# Altium schematic symbol library header-2x4.SchLib: 1 symbol
Pins are listed as number, name and electrical type; pins without a type are passive.

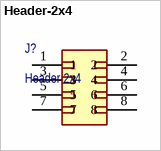
[diagram p0: symbol Header-2x4]

## Header-2x4
designator J?, comment Header 2x4
Dual-row, 8-pin connector; Manufacturer: *; Manufacturer Part Number: *
footprint Header-2x4-THT-P2.54 (2x4 vertical male pin header, 2.54 mm pitch, plated through-hole, 8 positions.)
pins: 1, 2, 3, 4, 5, 6, 7, 8